# Altium footprint library LimeMicroAltiumLib.PcbLib: 876 footprints (part 44 of 57)
Each footprint in its own frame and in the unit in brackets; x right, y up, seen from the top. Pads: shape width x height; smd on the part's side, far side on the other; paste and mask are expansions set on the pad; w line width, h text height; cw(c..) or ccw(c..) is an arc to the next point about the centre after c.
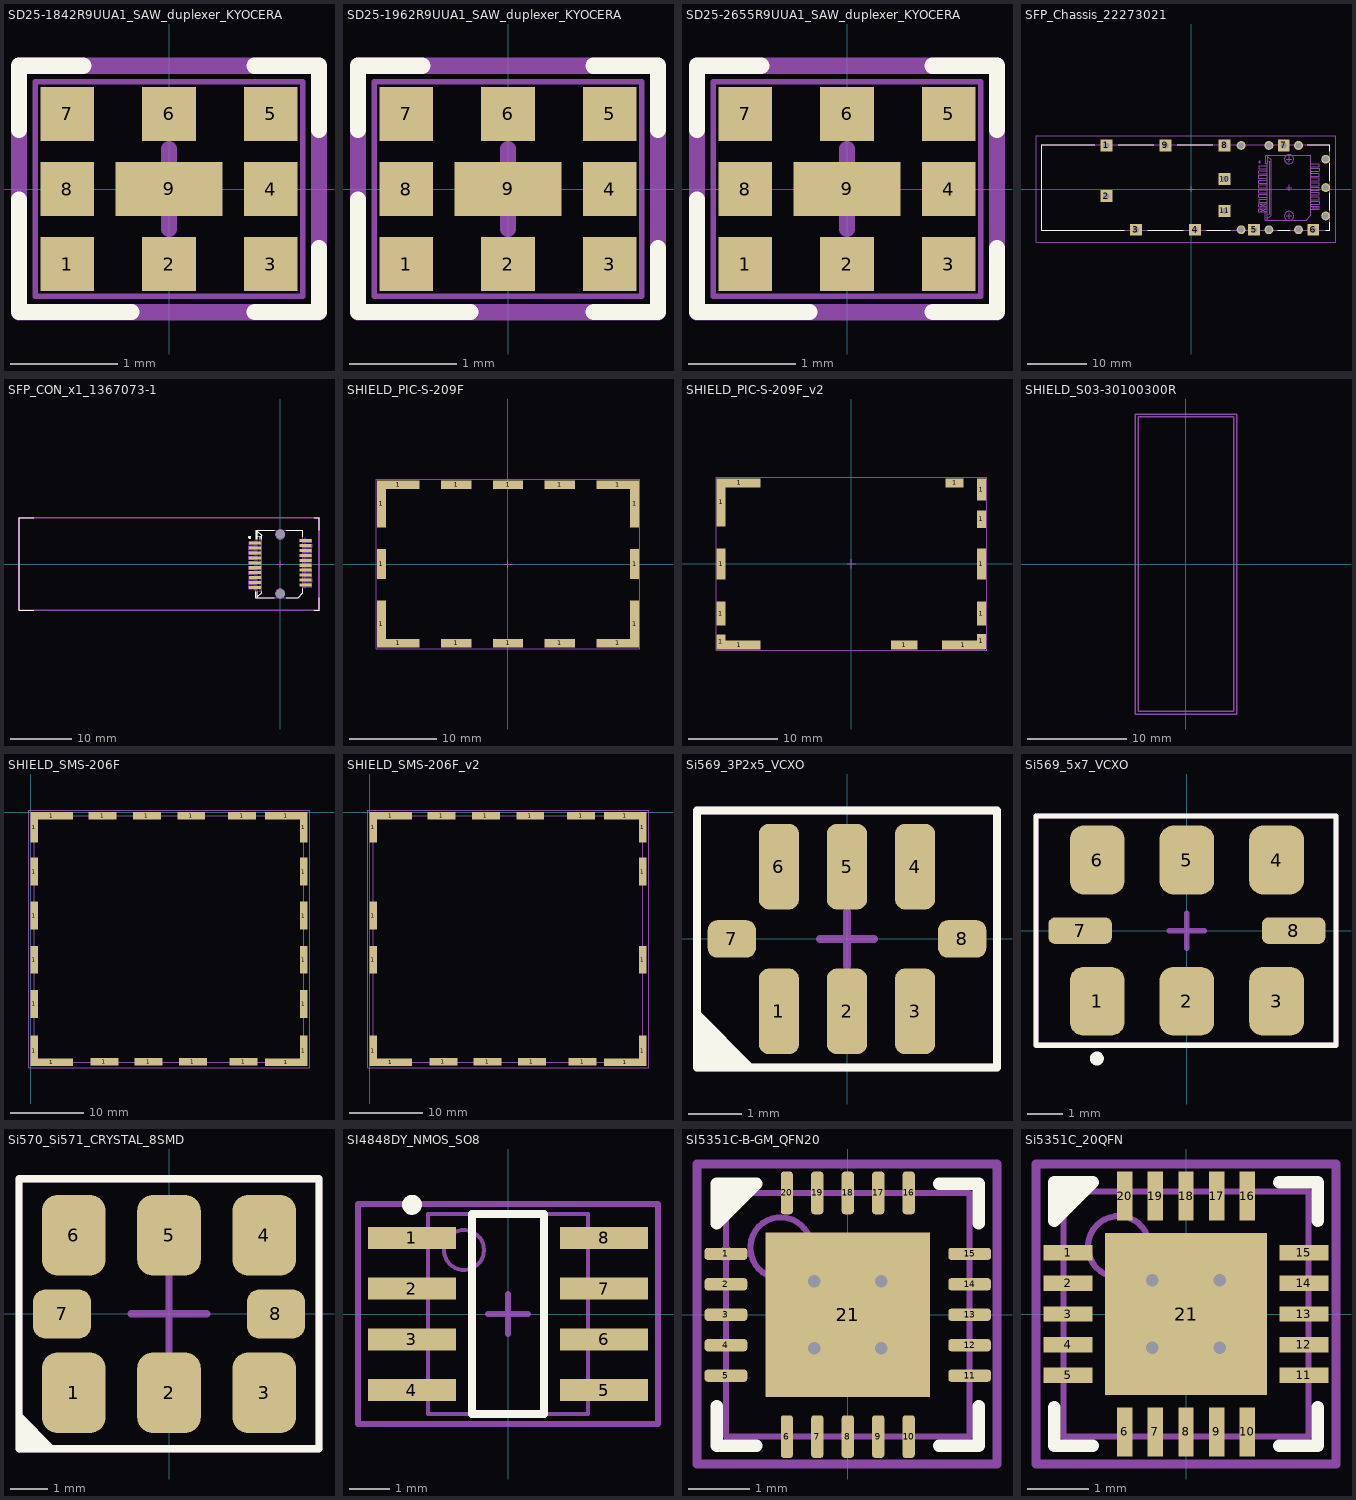
[diagram p43: the footprints below, top view; thin cyan lines are the x and y axes]

## SD25-1842R9UUA1_SAW_duplexer_KYOCERA [mm] "RF Duplexer 1.71GHz ~ 1.785GHz / 1.805GHz ~ 1.88GHz 9-SMD, No Lead"
pads (9):
  rect 0.5x0.5 smd mask+0.05: 1(-0.95,-0.7) 2(0,-0.7) 3(0.95,-0.7) 4(0.95,0) 5(0.95,0.7) 6(0,0.7) 7(-0.95,0.7) 8(-0.95,0)
  rect 1x0.5 smd mask+0.05: 9(0,0)
Top Overlay:
  lines w0.15: -1.4,-0.1 -1.4,-1.15 -0.35,-1.15 ; -1.4,0.55 -1.4,1.15 -0.8,1.15 ; 0.8,-1.15 1.4,-1.15 1.4,-0.55 ; 0.8,1.15 1.4,1.15 1.4,0.55
Mechanical 13:
  region: 0.45,0.2 0.45,-0.2 -0.45,-0.2 -0.45,0.2
  region: -0.75,0.2 -0.75,-0.2 -1.15,-0.2 -1.15,0.2
  region: -1.15,-0.5 -1.15,-0.9 -0.75,-0.9 -0.75,-0.5
  region: -0.2,-0.5 -0.2,-0.9 0.2,-0.9 0.2,-0.5
  region: 0.75,-0.5 0.75,-0.9 1.15,-0.9 1.15,-0.5
  region: 0.75,0.2 0.75,-0.2 1.15,-0.2 1.15,0.2
  region: 0.75,0.9 0.75,0.5 1.15,0.5 1.15,0.9
  region: -0.2,0.9 -0.2,0.5 0.2,0.5 0.2,0.9
  region: -1.15,0.9 -1.15,0.5 -0.75,0.5 -0.75,0.9
  lines w0.05: -1.25,-1 1.25,-1 1.25,1 -1.25,1 -1.25,-1
  text "7" at -0.675,0.6 h0.2
  text "5" at 0.525,0.6 h0.2
  text "3" at 0.525,-0.8 h0.2
  text "1" at -0.625,-0.8 h0.2
Mechanical 15:
  circle w0.2: c-0.925,-0.65 r0.035
  lines w0.15: -0.375,0 0,0 ; 0,-0.375 0,0 ; 0,0.375 0,0 ; 0.375,0 0,0 ; -1.4,-1.15 1.4,-1.15 1.4,1.15 -1.4,1.15 -1.4,-1.15
  text ".Designator" at 0,0 h0.55
3D body: height 0.9, standoff 0, extent -1.25,-1 1.25,1

## SD25-1962R9UUA1_SAW_duplexer_KYOCERA [mm] "RF Duplexer 1.85GHz ~ 1.915GHz / 1.93GHz ~ 1.995GHz 9-SMD, No Lead"
pads (9):
  rect 0.5x0.5 smd mask+0.05: 1(-0.95,-0.7) 2(0,-0.7) 3(0.95,-0.7) 4(0.95,0) 5(0.95,0.7) 6(0,0.7) 7(-0.95,0.7) 8(-0.95,0)
  rect 1x0.5 smd mask+0.05: 9(0,0)
Top Overlay:
  lines w0.15: -1.4,-0.1 -1.4,-1.15 -0.35,-1.15 ; -1.4,0.55 -1.4,1.15 -0.8,1.15 ; 0.8,-1.15 1.4,-1.15 1.4,-0.55 ; 0.8,1.15 1.4,1.15 1.4,0.55
Mechanical 13:
  region: 0.45,0.2 0.45,-0.2 -0.45,-0.2 -0.45,0.2
  region: -0.75,0.2 -0.75,-0.2 -1.15,-0.2 -1.15,0.2
  region: -1.15,-0.5 -1.15,-0.9 -0.75,-0.9 -0.75,-0.5
  region: -0.2,-0.5 -0.2,-0.9 0.2,-0.9 0.2,-0.5
  region: 0.75,-0.5 0.75,-0.9 1.15,-0.9 1.15,-0.5
  region: 0.75,0.2 0.75,-0.2 1.15,-0.2 1.15,0.2
  region: 0.75,0.9 0.75,0.5 1.15,0.5 1.15,0.9
  region: -0.2,0.9 -0.2,0.5 0.2,0.5 0.2,0.9
  region: -1.15,0.9 -1.15,0.5 -0.75,0.5 -0.75,0.9
  lines w0.05: -1.25,-1 1.25,-1 1.25,1 -1.25,1 -1.25,-1
  text "7" at -0.675,0.6 h0.2
  text "5" at 0.525,0.6 h0.2
  text "3" at 0.525,-0.8 h0.2
  text "1" at -0.625,-0.8 h0.2
Mechanical 15:
  circle w0.2: c-0.925,-0.65 r0.035
  lines w0.15: -0.375,0 0,0 ; 0,-0.375 0,0 ; 0,0.375 0,0 ; 0.375,0 0,0 ; -1.4,-1.15 1.4,-1.15 1.4,1.15 -1.4,1.15 -1.4,-1.15
  text ".Designator" at 0,0 h0.55
3D body: height 0.9, standoff 0, extent -1.25,-1 1.25,1

## SD25-2655R9UUA1_SAW_duplexer_KYOCERA [mm] "RF Duplexer 2.5GHz ~ 2.57GHz / 2.62GHz ~ 2.69GHz 9-SMD, No Lead"
pads (9):
  rect 0.5x0.5 smd mask+0.05: 1(-0.95,-0.7) 2(0,-0.7) 3(0.95,-0.7) 4(0.95,0) 5(0.95,0.7) 6(0,0.7) 7(-0.95,0.7) 8(-0.95,0)
  rect 1x0.5 smd mask+0.05: 9(0,0)
Top Overlay:
  lines w0.15: -1.4,-0.1 -1.4,-1.15 -0.35,-1.15 ; -1.4,0.55 -1.4,1.15 -0.8,1.15 ; 0.8,-1.15 1.4,-1.15 1.4,-0.55 ; 0.8,1.15 1.4,1.15 1.4,0.55
Mechanical 13:
  region: -1.15,0.9 -1.15,0.5 -0.75,0.5 -0.75,0.9
  region: -0.2,0.9 -0.2,0.5 0.2,0.5 0.2,0.9
  region: 0.75,0.9 0.75,0.5 1.15,0.5 1.15,0.9
  region: 0.75,0.2 0.75,-0.2 1.15,-0.2 1.15,0.2
  region: 0.75,-0.5 0.75,-0.9 1.15,-0.9 1.15,-0.5
  region: -0.2,-0.5 -0.2,-0.9 0.2,-0.9 0.2,-0.5
  region: -1.15,-0.5 -1.15,-0.9 -0.75,-0.9 -0.75,-0.5
  region: -0.75,0.2 -0.75,-0.2 -1.15,-0.2 -1.15,0.2
  region: 0.45,0.2 0.45,-0.2 -0.45,-0.2 -0.45,0.2
  lines w0.05: -1.25,-1 -1.25,1 1.25,1 1.25,-1 -1.25,-1
  text "1" at -0.625,-0.8 h0.2
  text "3" at 0.525,-0.8 h0.2
  text "5" at 0.525,0.6 h0.2
  text "7" at -0.675,0.6 h0.2
Mechanical 15:
  circle w0.2: c-0.925,-0.65 r0.035
  lines w0.15: -0.375,0 0,0 ; 0,-0.375 0,0 ; 0,0.375 0,0 ; 0.375,0 0,0 ; -1.4,-1.15 -1.4,1.15 1.4,1.15 1.4,-1.15 -1.4,-1.15
  text ".Designator" at 0,0 h0.55
3D body: height 0.9, standoff 0, extent -1.25,-1 1.25,1

## SFP_Chassis_22273021 [mm] "CONN SFP CAGE PRESS-FIT R/A"
pads (20):
  rect 2x2 hole 1.05: 1(-14.351,7.366) 2(-14.351,-1.209) 3(-9.351,-6.884) 4(0.649,-6.884) 5(10.649,-6.884) 6(20.649,-6.884) 7(15.649,7.366) 8(5.649,7.366) 9(-4.351,7.366) 10(5.649,1.691) 11(5.649,-3.709)
  round 1.5 hole 1: 12(8.449,-6.884) 13(13.149,-6.884) 14(18.149,-6.884) 15(22.749,-4.559) 16(22.749,0.241) 17(18.149,7.366) 18(13.149,7.366) 19(8.449,7.366) 20(22.749,5.041)
Top Overlay:
  lines w0.2: -16.351,7.491 -25.251,7.491 -25.251,-7.009 -11.351,-7.009 ; -12.351,7.491 -6.351,7.491 ; -7.351,-7.009 -1.351,-7.009 ; -2.351,7.491 3.649,7.491 ; 2.649,-7.009 6.649,-7.009 ; 14.649,-7.009 16.649,-7.009 ; 19.649,7.491 23.449,7.491 23.449,6.366 ; 22.749,-7.009 23.449,-7.009 23.449,-5.634 ; 23.449,-3.634 23.449,-0.634 ; 23.449,1.366 23.449,4.366
Mechanical 13:
  circle w0.1: c11.594,4.564 r0.125
  circle w0.1: c16.549,-4.559 r0.775
  circle w0.1: c16.549,5.041 r0.775
  lines w0.1: 12.849,-5.259 12.849,-3.859 ; 12.849,-5.059 13.569,-4.459 13.569,-4.259 ; 12.849,-4.196 13.569,-4.259 ; 12.849,-2.209 11.449,-2.209 11.449,-1.709 12.849,-1.709 ; 12.849,-1.409 11.449,-1.409 11.449,-0.909 12.849,-0.909 ; 12.849,-0.609 11.449,-0.609 11.449,-0.109 12.849,-0.109 ; 12.849,0.191 11.449,0.191 11.449,0.691 12.849,0.691 ; 12.849,0.991 11.449,0.991 11.449,1.491 12.849,1.491 ; 12.849,1.791 11.449,1.791 11.449,2.291 12.849,2.291 ; 12.849,2.591 11.449,2.591 11.449,3.091 12.849,3.091 ; 12.849,3.391 11.449,3.391 11.449,3.891 12.849,3.891 ; 12.849,4.678 13.569,4.741 ; 12.849,5.541 13.564,4.941 13.569,4.941 13.569,4.741 ; 12.849,5.741 12.849,4.341 ; 13.326,-4.238 13.326,4.72 ; 16.049,-4.559 16.549,-4.559 ; 16.049,0.246 16.549,0.246 ; 16.049,5.041 16.549,5.041 ; 16.549,-5.059 16.549,-4.559 ; 16.549,-4.059 16.549,-4.559 ; 16.549,-0.254 16.549,0.246 ; 16.549,0.746 16.549,0.246 ; 16.549,4.541 16.549,5.041 ; 16.549,5.541 16.549,5.041 ; 17.049,-4.559 16.549,-4.559 ; 17.049,0.246 16.549,0.246 ; 17.049,5.041 16.549,5.041 ; 20.249,-2.609 21.649,-2.609 21.649,-2.109 20.249,-2.109 ; 20.249,-1.809 21.649,-1.809 21.649,-1.309 20.249,-1.309 ; 20.249,-1.009 21.649,-1.009 21.649,-0.509 20.249,-0.509 ; 20.249,-0.209 21.649,-0.209 21.649,0.291 20.249,0.291 ; 20.249,0.591 21.649,0.591 21.649,1.091 20.249,1.091 ; 20.249,1.391 21.649,1.391 21.649,1.891 20.249,1.891 ; 20.249,2.191 21.649,2.191 21.649,2.691 20.249,2.691 ; 20.249,2.991 21.649,2.991 21.649,3.491 20.249,3.491 ; 20.249,3.791 21.649,3.791 21.649,4.291 20.249,4.291 ; 11.449,-3.809 12.849,-3.309 11.449,-3.309 ; 11.449,-3.809 11.449,-3.309 ; 11.449,-3.809 12.849,-3.809 11.449,-3.309 ; 11.449,-3.009 12.849,-2.509 11.449,-2.509 ; 11.449,-3.009 11.449,-2.509 ; 11.449,-3.009 12.849,-3.009 11.449,-2.509 ; 12.849,-3.859 12.549,-3.859 12.549,-5.259 19.449,-5.259 20.249,-4.459 20.249,5.741 12.549,5.741 12.549,4.341 12.849,4.341 ; 12.849,-3.859 12.849,4.341 ; 13.569,-4.259 13.569,4.741 ; 21.649,-3.409 20.249,-2.909 21.649,-2.909 ; 21.649,-3.409 21.649,-2.909 ; 21.649,-3.409 20.249,-3.409 21.649,-2.909
  lines w0.2: -25.251,-7.009 -25.251,7.491 23.449,7.491 23.449,-7.009 -25.251,-7.009
Mechanical 15:
  lines w0.15: -0.5,0 0.5,0 ; 0,-0.5 0,0.5
  lines w0.2: -26.251,-9 -26.251,9 24.499,9 24.499,-9 -26.251,-9
  text ".Designator" at 0,0 h0.55
3D body "2227302-1.stp": height 10.43, standoff -2.95, extent -25.951,-7.726 22.749,8.118

## SFP_CON_x1_1367073-1 [mm] "CONN SFP RCPT 20POS SLD R/A SMD"
height 1.55
pads (22):
  rect 2x0.5 smd: 1(-4.1,3.395) 2(-4.1,2.595) 3(-4.1,1.795) 4(-4.1,0.995) 5(-4.1,0.195) 6(-4.1,-0.605) 7(-4.1,-1.405) 8(-4.1,-2.205) 9(-4.1,-3.005) 10(-4.1,-3.805) 11(4.1,-3.405) 12(4.1,-2.605) 13(4.1,-1.805) 14(4.1,-1.005) 15(4.1,-0.205) 16(4.1,0.595) 17(4.1,1.395) 18(4.1,2.195) 19(4.1,2.995) 20(4.1,3.795)
  round 1 hole 1.55 unplated mask+0.28: MTG1(0,4.795) MTG2(0,-4.805)
Top Overlay:
  circle w0.25: c-4.955,4.318 r0.125
  lines w0.2: -42.4,7.475 -42.4,-7.499 -40,-7.499 ; -42.4,7.499 -40,7.499 ; -4,-4.505 -4,-5.505 -0.944,-5.505 ; -3.7,-5.505 -3.7,-4.505 ; -3.7,-5.305 -2.98,-4.705 -2.98,-4.505 ; -3.7,4.045 -3.7,5.495 ; -3.7,4.095 -4,4.095 -4,5.495 -0.944,5.495 ; -3.7,4.432 -2.98,4.495 ; -3.7,5.295 -2.98,4.695 -2.98,4.045 ; -3.223,4.045 -3.223,4.474 ; 0.944,-5.505 2.9,-5.505 3.7,-4.705 3.7,-4.055 ; 0.944,5.495 3.7,5.495 3.7,4.445 ; 5.5,-7.499 6.3,-7.499 6.3,-5.502 ; 5.5,7.499 6.3,7.499 6.3,5.502
Mechanical 13:
  circle w0.1: c-4.955,4.318 r0.125
  circle w0.1: c0,-4.805 r0.775
  circle w0.1: c0,4.795 r0.775
  lines w0.1: -4.6,-3.805 -4.1,-3.805 -3.6,-3.805 ; -4.6,-3.005 -4.1,-3.005 -3.6,-3.005 ; -4.6,-2.205 -4.1,-2.205 -3.6,-2.205 ; -4.6,-1.405 -4.1,-1.405 -3.6,-1.405 ; -4.6,-0.605 -4.1,-0.605 -3.6,-0.605 ; -4.6,0.195 -4.1,0.195 -3.6,0.195 ; -4.6,0.995 -4.1,0.995 -3.6,0.995 ; -4.6,1.795 -4.1,1.795 -3.6,1.795 ; -4.6,2.595 -4.1,2.595 -3.6,2.595 ; -4.6,3.395 -4.1,3.395 -3.6,3.395 ; -4.1,-4.305 -4.1,3.895 ; -3.7,-5.505 -3.7,-4.105 ; -3.7,-5.305 -2.98,-4.705 -2.98,-4.505 ; -3.7,-4.442 -2.98,-4.505 ; -3.7,-4.055 -5.1,-4.055 -5.1,-3.555 -3.7,-3.555 ; -3.7,-3.255 -5.1,-3.255 -5.1,-2.755 -3.7,-2.755 ; -3.7,-2.455 -5.1,-2.455 -5.1,-1.955 -3.7,-1.955 ; -3.7,-1.655 -5.1,-1.655 -5.1,-1.155 -3.7,-1.155 ; -3.7,-0.855 -5.1,-0.855 -5.1,-0.355 -3.7,-0.355 ; -3.7,-0.055 -5.1,-0.055 -5.1,0.445 -3.7,0.445 ; -3.7,0.745 -5.1,0.745 -5.1,1.245 -3.7,1.245 ; -3.7,1.545 -5.1,1.545 -5.1,2.045 -3.7,2.045 ; -3.7,2.345 -5.1,2.345 -5.1,2.845 -3.7,2.845 ; -3.7,3.145 -5.1,3.145 -5.1,3.645 -3.7,3.645 ; -3.7,4.432 -2.98,4.495 ; -3.7,5.295 -2.985,4.695 -2.98,4.695 -2.98,4.495 ; -3.7,5.495 -3.7,4.095 ; -3.223,-4.484 -3.223,4.474 ; -0.5,-4.805 0,-4.805 ; -0.5,0 0,0 ; -0.5,4.795 0,4.795 ; 0,-5.305 0,-4.805 ; 0,-4.305 0,-4.805 ; 0,-0.5 0,0 ; 0,0.5 0,0 ; 0,4.295 0,4.795 ; 0,5.295 0,4.795 ; 0.5,-4.805 0,-4.805 ; 0.5,0 0,0 ; 0.5,4.795 0,4.795 ; 3.6,-3.405 4.1,-3.405 4.6,-3.405 ; 3.6,-2.605 4.1,-2.605 4.6,-2.605 ; 3.6,-1.805 4.1,-1.805 4.6,-1.805 ; 3.6,-1.005 4.1,-1.005 4.6,-1.005 ; 3.6,-0.205 4.1,-0.205 4.6,-0.205 ; 3.6,0.595 4.1,0.595 4.6,0.595 ; 3.6,1.395 4.1,1.395 4.6,1.395 ; 3.6,2.195 4.1,2.195 4.6,2.195 ; 3.6,2.995 4.1,2.995 4.6,2.995 ; 3.6,3.795 4.1,3.795 4.6,3.795 ; 3.7,-3.655 5.1,-3.655 5.1,-3.155 3.7,-3.155 ; 3.7,-2.855 5.1,-2.855 5.1,-2.355 3.7,-2.355 ; 3.7,-2.055 5.1,-2.055 5.1,-1.555 3.7,-1.555 ; 3.7,-1.255 5.1,-1.255 5.1,-0.755 3.7,-0.755 ; 3.7,-0.455 5.1,-0.455 5.1,0.045 3.7,0.045 ; 3.7,0.345 5.1,0.345 5.1,0.845 3.7,0.845 ; 3.7,1.145 5.1,1.145 5.1,1.645 3.7,1.645 ; 3.7,1.945 5.1,1.945 5.1,2.445 3.7,2.445 ; 3.7,2.745 5.1,2.745 5.1,3.245 3.7,3.245 ; 3.7,3.545 5.1,3.545 5.1,4.045 3.7,4.045 ; 4.1,-3.905 4.1,4.295 ; -3.7,-4.105 -4,-4.105 -4,-5.505 2.9,-5.505 3.7,-4.705 3.7,5.495 -4,5.495 -4,4.095 -3.7,4.095 ; -3.7,-4.105 -3.7,4.095 ; -2.98,-4.505 -2.98,4.495
Mechanical 15:
  circle w0.25: c-4.955,4.318 r0.125
  circle w0.1: c-4.955,4.318 r0.125
  lines w0.15: -0.525,0 0.475,0 ; -0.025,-0.5 -0.025,0.5
  lines w0.2: -4,-4.505 -4,-5.505 -0.944,-5.505 ; -3.7,-5.505 -3.7,-4.505 ; -3.7,-5.305 -2.98,-4.705 -2.98,-4.505 ; -3.7,4.045 -3.7,5.495 ; -3.7,4.095 -4,4.095 -4,5.495 -0.944,5.495 ; -3.7,4.432 -2.98,4.495 ; -3.7,5.295 -2.98,4.695 -2.98,4.045 ; -3.223,4.045 -3.223,4.474 ; 0.944,-5.505 2.9,-5.505 3.7,-4.705 3.7,-4.055 ; 0.944,5.495 3.7,5.495 3.7,4.445
  lines w0.3: -42.4,-7.5 6.3,-7.5 6.3,7.5 -42.4,7.5 -42.4,-7.5
  text ".Designator" at -0.025,0 h0.55
3D body "sfp-30k-gsf.step": height 9.89, standoff -2.43, extent -50.872,-6.769 4.5,6.82
3D body "TYCO_1367073-1.stp": height 5.22, standoff -0.81, extent -4.5,-5.505 4.5,5.495

## SHIELD_PIC-S-209F [mm]
pads (16):
  rect 1x5.4 smd mask+0.05: 1(-14.55,-6.925) 1(-14.55,6.925) 1(14.55,-6.925) 1(14.55,6.925)
  rect 1x3.5 smd mask+0.05: 1(-14.55,0) 1(14.55,0)
  rect 4.85x1 smd mask+0.05: 1(-12.625,-9.125) 1(-12.625,9.125) 1(12.625,-9.125) 1(12.625,9.125)
  rect 3.5x1 smd mask+0.05: 1(-5.975,-9.125) 1(-5.975,9.125) 1(0,-9.125) 1(0,9.125) 1(5.975,-9.125) 1(5.975,9.125)
Mechanical 15:
  lines w0.1: -0.5,0 0,0 ; 0,-0.5 0,0 ; 0,0.5 0,0 ; 0.5,0 0,0 ; -15.15,-9.725 -15.15,9.725 15.15,9.725 15.15,-9.725 -15.15,-9.725
  text "RFI shield frame" at -3.7,-9.2 h0.55
  text ".Designator" at 0,0 h0.55

## SHIELD_PIC-S-209F_v2 [mm]
pads (14):
  rect 1x1.7 smd mask+0.05: 1(-14.675,-8.8) 1(14.625,-8.725)
  rect 1x2.7 smd mask+0.05: 1(-14.675,-5.6) 1(14.625,-5.6)
  rect 1x3.5 smd mask+0.05: 1(-14.675,-0.025) 1(14.625,-0.025)
  rect 1x5.4 smd mask+0.05: 1(-14.675,6.9)
  rect 4.85x1 smd mask+0.05: 1(-12.65,-9.15) 1(-12.65,9.1) 1(12.6,-9.15)
  rect 3x1 smd mask+0.05: 1(5.95,-9.15)
  rect 2x1 smd mask+0.05: 1(11.6,9.1)
  rect 1x2 smd mask+0.05: 1(14.625,5)
  rect 1x2.5 smd mask+0.05: 1(14.625,8.35)
Mechanical 15:
  lines w0.1: -0.5,0 0,0 ; 0,-0.5 0,0 ; 0,0.5 0,0 ; 0.5,0 0,0 ; -15.225,-9.725 15.225,-9.725 15.225,9.725 -15.225,9.725 -15.225,-9.725
  text ".Designator" at 0,0 h0.55
  text "RFI shield frame" at -3.775,-9.2 h0.55

## SHIELD_S03-30100300R [mm] "RF Shield CAN 0.394\" (10.00mm) X 1.181\" (30.00mm) Non-Vented Surface Mount"
Mechanical 13:
  lines w0.1: -5.075,-15.025 5.075,-15.025 5.075,15.075 -5.075,15.075 -5.075,-15.025
Mechanical 15:
  lines w0.15: -5.1,-15.025 5.1,-15.025 5.1,15.075 -5.1,15.075 -5.1,-15.025 ; -4.8,-14.725 4.8,-14.725 4.8,14.775 -4.8,14.775 -4.8,-14.725
  text "RF shield" at -2.5,-13.625 h0.55
  text ".Designator" at 0.075,-0.375 h0.55
3D body "s03-30100300.stp": height 3.4, standoff 0.25, extent -5.075,-15.075 5.075,15.075

## SHIELD_SMS-206F [mm] "RF Shield  Frame+Cover 1.348\" (34.24mm) X 1.472\" (37.39mm) Vented Surface Mount"
pads (24):
  rect 1x4.14 smd mask+0.05: 1(0.5,-32.402) 1(0.5,-2.075) 1(37.143,-32.402) 1(37.143,-2.075)
  rect 1x3.785 smd mask+0.05: 1(0.5,-26.055) 1(0.5,-20.06) 1(0.5,-14.065) 1(0.5,-8.07) 1(37.143,-26.055) 1(37.143,-20.06) 1(37.143,-14.065) 1(37.143,-8.07)
  rect 5.715x1 smd mask+0.05: 1(2.9,-33.977) 1(2.9,-0.5) 1(34.743,-33.977) 1(34.743,-0.5)
  rect 3.81x1 smd mask+0.05: 1(9.8,-0.5) 1(10.025,-33.925) 1(28.75,-0.5) 1(28.975,-33.925)
  rect 3.785x1 smd mask+0.05: 1(15.825,-0.5) 1(16.05,-33.925) 1(21.85,-0.5) 1(22.075,-33.925)
Mechanical 13:
  lines w0.1: 0.5,-33.977 0.5,-0.5 37.143,-0.5 37.143,-33.977 0.5,-33.977
Mechanical 15:
  lines w0.15: -0.25,-34.75 -0.25,0.275 37.925,0.275 37.925,-34.75 -0.25,-34.75
  text ".Designator" at 18.375,-17.15 h0.55
  text "RF shield" at 31.15,-33.05 h0.55

## SHIELD_SMS-206F_v2 [mm] "RF Shield  Frame+Cover 1.348\" (34.24mm) X 1.472\" (37.39mm) Vented Surface Mount"
pads (20):
  rect 1x4.14 smd mask+0.05: 1(0.5,-32.402) 1(0.5,-2.075) 1(37.143,-32.402) 1(37.143,-2.075)
  rect 1x3.785 smd mask+0.05: 1(0.5,-20.06) 1(0.5,-14.065) 1(37.143,-20.06) 1(37.143,-8.07)
  rect 5.715x1 smd mask+0.05: 1(2.9,-33.977) 1(2.9,-0.5) 1(34.743,-33.977) 1(34.743,-0.5)
  rect 3.81x1 smd mask+0.05: 1(9.8,-0.5) 1(10.025,-33.925) 1(28.75,-0.5) 1(28.975,-33.925)
  rect 3.785x1 smd mask+0.05: 1(15.825,-0.5) 1(16.05,-33.925) 1(21.85,-0.5) 1(22.075,-33.925)
Mechanical 13:
  lines w0.1: 0.5,-33.977 37.143,-33.977 37.143,-0.5 0.5,-0.5 0.5,-33.977
Mechanical 15:
  lines w0.15: -0.25,-34.75 37.925,-34.75 37.925,0.275 -0.25,0.275 -0.25,-34.75
  text "RF shield" at 31.15,-33.05 h0.55
  text ".Designator" at 18.375,-17.15 h0.55

## Si569_3P2x5_VCXO [mm]
pads (8):
  rrect50% 0.75x1.6 smd mask+0.05: 1(-1.27,-1.35) 2(0,-1.35) 3(1.27,-1.35) 4(1.27,1.35) 5(0,1.35) 6(-1.27,1.35)
  rrect50% 0.9x0.7 smd mask+0.05: 7(-2.15,0) 8(2.15,0)
Top Overlay:
  region: -1.7,-2.4 -2.8,-1.3 -2.8,-2.4
  lines w0.15: -2.8,-2.4 -2.8,2.4 2.8,2.4 2.8,-2.4 -2.8,-2.4
Mechanical 15:
  lines w0.15: -0.5,0 0.5,0 ; 0,-0.5 0,0.5 ; -2.8,-2.4 2.8,-2.4 2.8,2.4 -2.8,2.4 -2.8,-2.4
  text ".Designator" at 0,0 h0.55
  text "1" at -1.25,-1.75 h0.55
  text "2" at -0.2,-1.7 h0.55
  text "3" at 1.1,-1.7 h0.55
  text "4" at 1.1,1.1 h0.55
  text "5" at -0.2,1.1 h0.55
  text "6" at -1.5,1.1 h0.55
  text "7" at -2.3,-0.3 h0.55
  text "8" at 2,-0.3 h0.55
3D body: height 1.13, standoff 0, extent -2.5,-1.6 2.5,1.6

## Si569_5x7_VCXO [mm]
pads (8):
  rrect50% 1.55x1.95 smd mask+0.05: 1(-2.54,-2) 2(0,-2) 3(2.54,-2) 4(2.54,2) 5(0,2) 6(-2.54,2)
  rrect50% 1.8x0.75 smd mask+0.05: 7(-3.025,0) 8(3.025,0)
Top Overlay:
  circle w0.2: c-2.55,-3.625 r0.1
  lines w0.15: -4.275,-3.25 -4.275,3.25 4.225,3.25 4.225,-3.25 -4.275,-3.25
Mechanical 15:
  lines w0.15: -0.5,0 0.5,0 ; 0,-0.5 0,0.5 ; -4.275,-3.25 4.225,-3.25 4.225,3.25 -4.275,3.25 -4.275,-3.25
  text ".Designator" at 0,0 h0.55
  text "1" at -2.6,-2.2 h0.55
  text "2" at -0.2,-2.2 h0.55
  text "3" at 2.3,-2.2 h0.55
  text "4" at 2.3,1.8 h0.55
  text "5" at -0.2,1.8 h0.55
  text "6" at -2.6,1.8 h0.55
  text "7" at -3.2,-0.3 h0.55
  text "8" at 2.9,-0.3 h0.55
3D body: height 1.13, standoff 0, extent -3.5,-2.5 3.5,2.5

## Si570_Si571_CRYSTAL_8SMD [mm]
pads (8):
  rrect50% 1.7x2.15 smd mask+0.05: 1(-2.54,-2.1) 2(0,-2.1) 3(2.54,-2.1) 4(2.54,2.1) 5(0,2.1) 6(-2.54,2.1)
  rrect50% 1.545x1.3 smd mask+0.05: 7(-2.852,0) 8(2.852,0)
Top Overlay:
  region: -4,-3.6 -3,-3.6 -4,-2.6
  lines w0.2: -4,-3.6 -4,3.6 4,3.6 4,-3.6 -4,-3.6
Mechanical 15:
  circle w0.2: c-2.4,-2.1 r0.141
  lines w0.2: -1,0 0,0 ; 0,-1 0,0 ; 0,1 0,0 ; 1,0 0,0 ; -4,-3.6 4,-3.6 4,3.6 -4,3.6 -4,-3.6
  text ".Designator" at 0,0 h0.55
3D body: height 1.65, standoff 0, extent 5,-5 5,-5
3D body: height 1.65, standoff 0, extent -3.5,-2.5 3.5,2.5
3D body: height 1.66, standoff 0, extent -3.199,-2.2 -2.801,-1.8

## SI4848DY_NMOS_SO8 [mm] "SOIC, 8-Leads, Body 4,90x3,90mm, Pitch 1,27mm, IPC Medium Density"
height 1.7
pads (8):
  rect 2.2x0.55 smd: 1(-2.4,1.905) 2(-2.4,0.635) 3(-2.4,-0.635) 4(-2.4,-1.905) 5(2.4,-1.905) 6(2.4,-0.635) 7(2.4,0.635) 8(2.4,1.905)
Top Overlay:
  circle w0.25: c-2.4,2.73 r0.125
  lines w0.2: -0.9,-2.5 0.9,-2.5 0.9,2.5 -0.9,2.5 -0.9,-2.5
Mechanical 13:
  circle w0.1: c-1.1,1.6 r0.5
  lines w0.1: -2,-2.5 2,-2.5 2,2.5 -2,2.5 -2,-2.5
Mechanical 15:
  lines w0.15: -0.5,0 0.5,0 ; 0,-0.5 0,0.5 ; -3.75,-2.75 3.75,-2.75 3.75,2.75 -3.75,2.75 -3.75,-2.75
  text ".Designator" at 0,0 h0.55
3D body "CircuitWorks-SO-8.step": height 1.45, standoff 0, extent -2.889,-2.45 2.889,2.452

## SI5351C-B-GM_QFN20 [mm] "QFN, 20-Leads, Body 4,00x4,00mm, Pitch 0,50mm, Thermal Pad 2,70x2,70mm, IPC Medium Density"
height 0.85
pads (21):
  rrect50% 0.7x0.2 smd mask+0.05: 1(-2,1) 2(-2,0.5) 3(-2,0) 4(-2,-0.5) 5(-2,-1) 11(2,-1) 12(2,-0.5) 13(2,0) 14(2,0.5) 15(2,1)
  rrect50% 0.2x0.7 smd mask+0.05: 6(-1,-2) 7(-0.5,-2) 8(0,-2) 9(0.5,-2) 10(1,-2) 16(1,2) 17(0.5,2) 18(0,2) 19(-0.5,2) 20(-1,2)
  rect 2.7x2.7 smd mask+0.05: 21(0,0)
via -0.55,0.55 diameter 0.5 hole 0.2
via 0.55,0.55 diameter 0.5 hole 0.2
via -0.55,-0.55 diameter 0.5 hole 0.2
via 0.55,-0.55 diameter 0.5 hole 0.2
Top Overlay:
  region: -2.15,1.4 -1.4,2.15 -2.15,2.15
  lines w0.2: -2.15,-1.5 -2.15,-2.15 -1.5,-2.15 ; 1.5,-2.15 2.15,-2.15 2.15,-1.5 ; 1.5,2.15 2.15,2.15 2.15,1.5 ; -2.15,1.5 -1.5,2.15 -2.15,2.15 -2.15,1.5
Mechanical 13:
  circle w0.1: c-1.1,1.1 r0.5
  lines w0.1: -2,-2 -2,2 2,2 2,-2 -2,-2
Mechanical 15:
  circle w0.15: c-2,1 r0.05
  lines w0.15: -0.5,0 0.5,0 ; 0,-0.5 0,0.5 ; -2.475,-2.45 -2.475,2.475 2.45,2.475 2.45,-2.45 -2.475,-2.45
  text ".Designator" at 0,0 h0.55
3D body "User Library-QFN4x4_20pins.step": height 0.8, standoff 0, extent -2.02,-2.02 2.02,2.02

## Si5351C_20QFN [mm] "QFN, 20-Leads, Body 4,00x4,00mm, Pitch 0,50mm, Thermal Pad 2,70x2,70mm, IPC Medium Density"
height 0.8
pads (21):
  rect 0.8x0.25 smd mask+0.05: 1(-1.925,1) 2(-1.925,0.5) 3(-1.925,0) 4(-1.925,-0.5) 5(-1.925,-1) 11(1.925,-1) 12(1.925,-0.5) 13(1.925,0) 14(1.925,0.5) 15(1.925,1)
  rect 0.25x0.8 smd mask+0.05: 6(-1,-1.925) 7(-0.5,-1.925) 8(0,-1.925) 9(0.5,-1.925) 10(1,-1.925) 16(1,1.925) 17(0.5,1.925) 18(0,1.925) 19(-0.5,1.925) 20(-1,1.925)
  rect 2.65x2.65 smd mask+0.05: 21(0,0)
via -0.55,0.55 diameter 0.4 hole 0.2
via 0.55,0.55 diameter 0.4 hole 0.2
via -0.55,-0.55 diameter 0.4 hole 0.2
via 0.55,-0.55 diameter 0.4 hole 0.2
Top Overlay:
  region: -2.15,1.425 -1.425,2.15 -2.15,2.15
  lines w0.2: -2.15,-1.525 -2.15,-2.15 -1.525,-2.15 ; 1.525,-2.15 2.15,-2.15 2.15,-1.525 ; 1.525,2.15 2.15,2.15 2.15,1.525 ; -2.15,1.525 -2.15,2.15 -1.525,2.15 -2.15,1.525
Mechanical 13:
  circle w0.1: c-1.1,1.1 r0.5
  lines w0.1: -2,-2 -2,2 2,2 2,-2 -2,-2
Mechanical 15:
  lines w0.15: -0.5,0 0.5,0 ; 0,-0.5 0,0.5 ; -2.45,-2.45 -2.45,2.45 2.45,2.45 2.45,-2.45 -2.45,-2.45
  text ".Designator" at 0,0 h0.55
3D body "User Library-QFN4x4_20pins.step": height 0.8, standoff 0, extent -2.02,-2.02 2.02,2.02